# EAGLE library part IC_OP-AMP_LMV324 (library dp_devices.v6)
LMV324 Quad, Low voltage op-amp (2.7 - 5.0V)
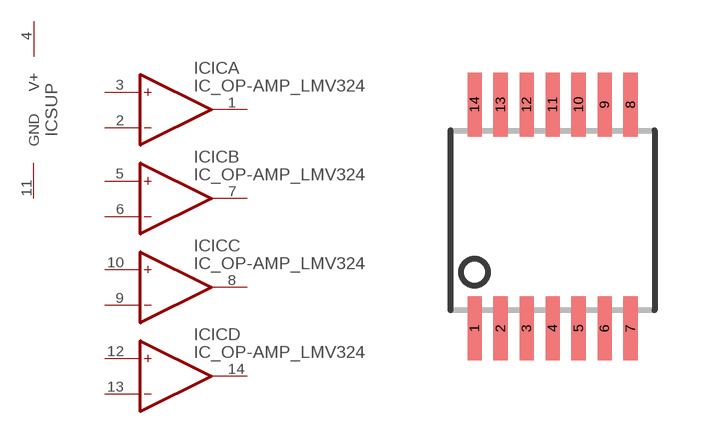
[diagram p183: symbol with the pads of TSSOP-14; footprint TSSOP-14]

Designator prefix IC; gates ICA=OPAMP ICB=OPAMP ICC=OPAMP ICD=OPAMP SUP=SUPPLY

## IC_OP-AMP_LMV324  [TSSOP-14]
1  ICA:OUT  out
2  ICA:-  in
3  ICA:+  in
4  SUP:V+  sup
5  ICB:+  in
6  ICB:-  in
7  ICB:OUT  out
8  ICC:OUT  out
9  ICC:-  in
10  ICC:+  in
11  SUP:GND  sup
12  ICD:+  in
13  ICD:-  in
14  ICD:OUT  out

## Footprint TSSOP-14 (pad centres in mm)
smd 0.35 x 1.6: 1 -1.95,-2.7; 2 -1.3,-2.7; 3 -0.65,-2.7; 4 0,-2.7; 5 0.65,-2.7; 6 1.3,-2.7; 7 1.95,-2.7; 8 1.95,2.9; 9 1.3,2.9; 10 0.65,2.9; 11 0,2.9; 12 -0.65,2.9; 13 -1.3,2.9; 14 -1.95,2.9